# Altium footprint library Module.PcbLib: 88 footprints (part 1 of 6)
Each footprint in its own frame and in the unit in brackets; x right, y up, seen from the top. Pads: shape width x height; smd on the part's side, far side on the other; paste and mask are expansions set on the pad; w line width, h text height; cw(c..) or ccw(c..) is an arc to the next point about the centre after c.
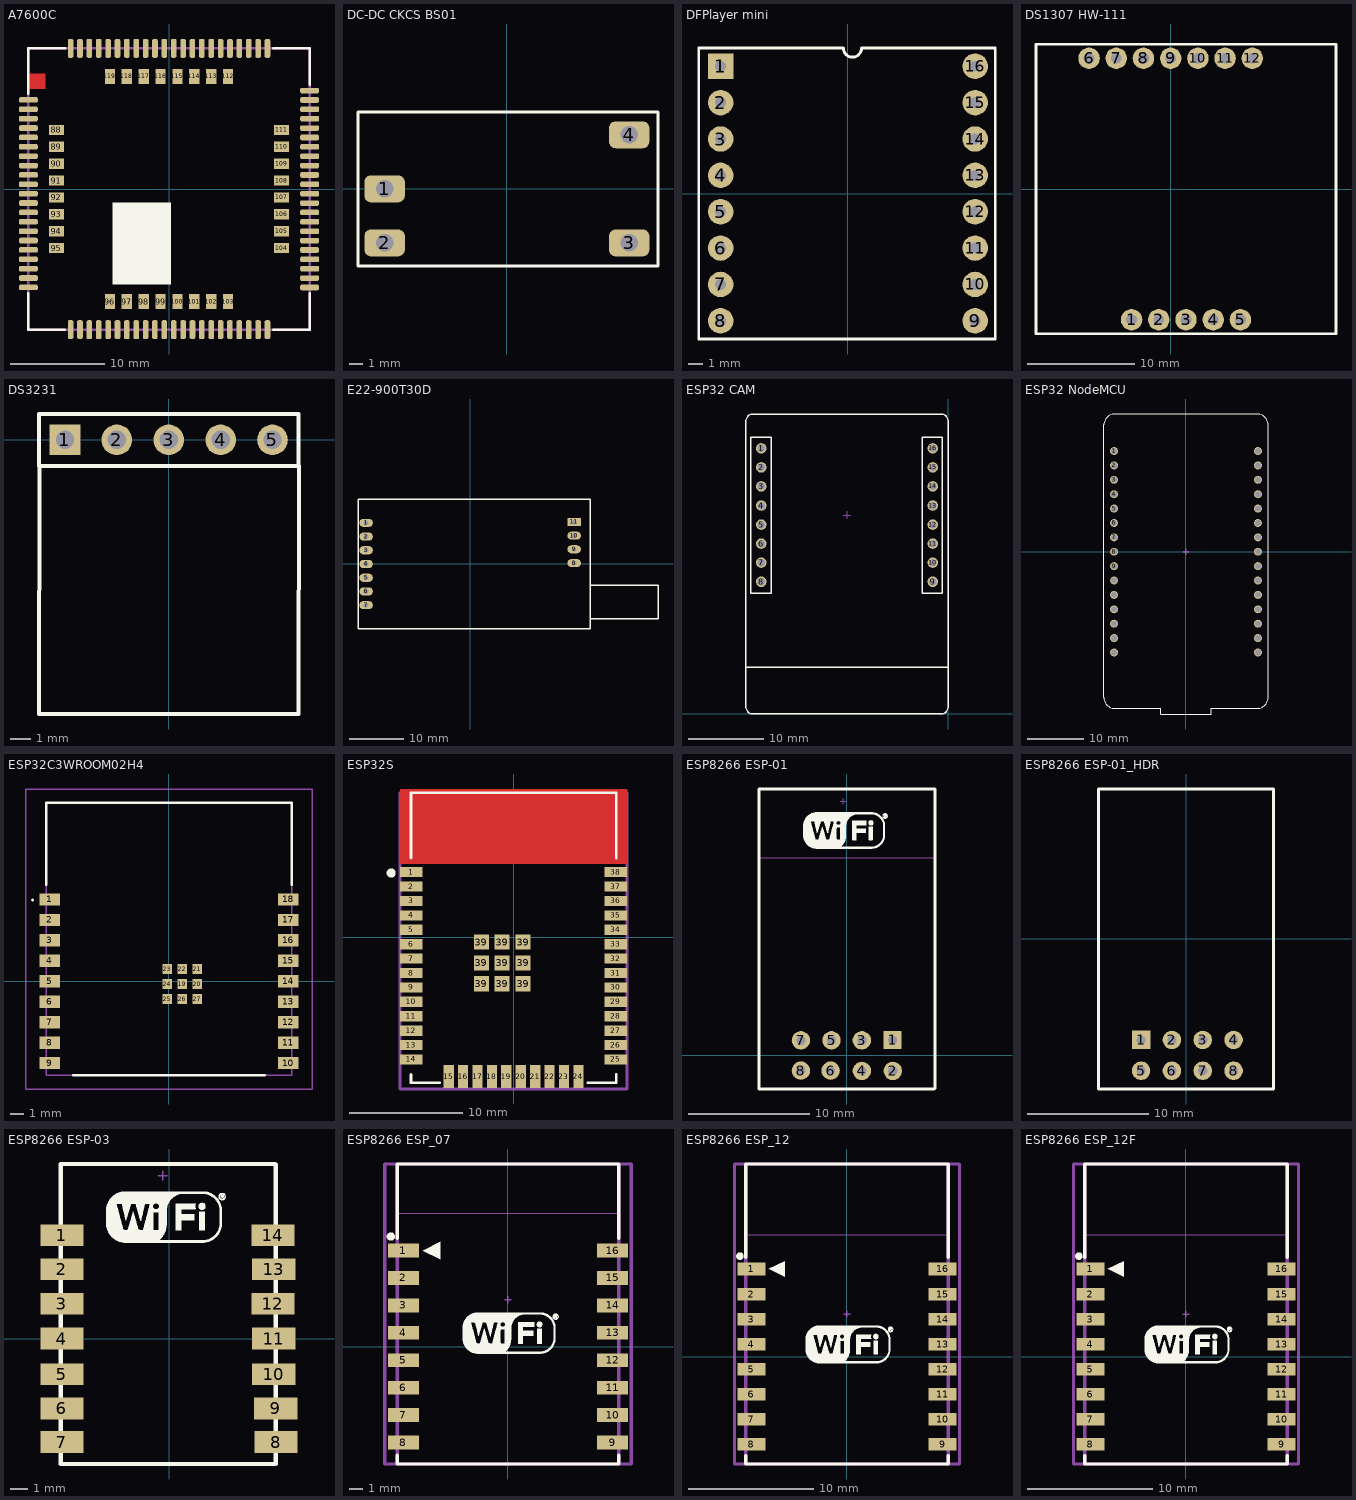
[diagram p0: the footprints below, top view; thin cyan lines are the x and y axes]

## A7600C [mm] "SIM7600 Series"
pads (119):
  rrect50% 2x0.6 smd mask+0.102: 1(-15,9.5) 2(-15,8.5) 3(-15,7.5) 4(-15,6.5) 5(-15,5.5) 6(-15,4.5) 7(-15,3.5) 8(-15,2.5) 9(-15,1.5) 10(-15,0.5) 11(-15,-0.5) 12(-15,-1.5) 13(-15,-2.5) 14(-15,-3.5) 15(-15,-4.5) 16(-15,-5.5) 17(-15,-6.5) 18(-15,-7.5) 19(-15,-8.5) 20(-15,-9.5) 41(15,-9.5) 42(15,-8.5) 43(15,-7.5) 44(15,-6.5) 45(15,-5.5) 46(15,-4.5) 47(15,-3.5) 48(15,-2.5) 49(15,-1.5) 50(15,-0.5) 51(15,0.5) 52(15,1.5) 53(15,2.5) 54(15,3.5) 55(15,4.5) 56(15,5.5) 57(15,6.5) 58(15,7.5) 59(15,8.5) 60(15,9.5) 81(-15,-10.5) 82(15,-10.5) 85(15,10.5)
  rrect50% 0.6x2 smd mask+0.102: 21(-9.5,-15) 22(-8.5,-15) 23(-7.5,-15) 24(-6.5,-15) 25(-5.5,-15) 26(-4.5,-15) 27(-3.5,-15) 28(-2.5,-15) 29(-1.5,-15) 30(-0.5,-15) 31(0.5,-15) 32(1.5,-15) 33(2.5,-15) 34(3.5,-15) 35(4.5,-15) 36(5.5,-15) 37(6.5,-15) 38(7.5,-15) 39(8.5,-15) 40(9.5,-15) 61(9.5,15) 62(8.5,15) 63(7.5,15) 64(6.5,15) 65(5.5,15) 66(4.5,15) 67(3.5,15) 68(2.5,15) 69(1.5,15) 70(0.5,15) 71(-0.5,15) 72(-1.5,15) 73(-2.5,15) 74(-3.5,15) 75(-4.5,15) 76(-5.5,15) 77(-6.5,15) 78(-7.5,15) 79(-8.5,15) 80(-9.5,15) 83(10.5,-15) 84(-10.5,-15) 86(-10.5,15) 87(10.5,15)
  rect 1.6x1.1 smd mask+0.102: 88(-12,6.3) 89(-12,4.5) 90(-12,2.7) 91(-12,0.9) 92(-12,-0.9) 93(-12,-2.7) 94(-12,-4.5) 95(-12,-6.3) 104(12,-6.3) 105(12,-4.5) 106(12,-2.7) 107(12,-0.9) 108(12,0.9) 109(12,2.7) 110(12,4.5) 111(12,6.3)
  rect 1.1x1.6 smd mask+0.102: 96(-6.3,-12) 97(-4.5,-12) 98(-2.7,-12) 99(-0.9,-12) 100(0.9,-12) 101(2.7,-12) 102(4.5,-12) 103(6.3,-12) 112(6.3,12) 113(4.5,12) 114(2.7,12) 115(0.9,12) 116(-0.9,12) 117(-2.7,12) 118(-4.5,12) 119(-6.3,12)
Top Layer:
  pour cut-out: -15,12.3 -13.2,12.3 -13.2,10.7 -15,10.7
Top Overlay:
  region: -6.02,-10.16 0.178,-10.16 0.178,-1.473 -6.02,-1.473
  lines w0.254: -15,-11.125 -15,-15 -11.1,-15 ; -15,10.135 -15,15 -11.074,15 ; 11.1,15 15,15 15,11.125 ; 11.125,-15 15,-15 15,-11.1
Top Designator:
  text ".Designator" at -3.711,-0.344 h1.52
Mechanical 15:
  lines w0.254: -15,-15 -15,15 15,15 15,-15 -15,-15
3D body "User Library-User Library-SIM7600C.step": height 3.17, standoff 0, extent -15,-15 15,15

## DC-DC CKCS BS01 [mm] "DC-DC Convert"
pads (4):
  rrect50% 3x2 hole 1.3: 1(-9.05,0) 2(-9.05,-4) 3(9.05,-4) 4(9.05,4)
Top Overlay:
  lines w0.254: -11.015,-5.712 -11.015,5.688 11.185,5.688 11.185,-5.712 -11.015,-5.712
Top Designator:
  text ".Designator" at -3.626,-0.356 h1.52
Mechanical 12:
  text ".Designator" at -4.783,-0.463 h2
3D body "CKCS BS01 MT-3608 Boost Converter.step": height 4.1, standoff 0.3, extent -11.015,-5.612 11.185,5.588

## DFPlayer mini [mil] "DFPlayer mini"
pads (16):
  rect 70x70 hole 30: 1(-350,350)
  round 70 hole 30: 2(-350,250) 3(-350,150) 4(-350,50) 5(-350,-50) 6(-350,-150) 7(-350,-250) 8(-350,-350) 9(350,-350) 10(350,-250) 11(350,-150) 12(350,-50) 13(350,50) 14(350,150) 15(350,250) 16(350,350)
Top Overlay:
  lines w7.87: -410,-400 -410,400 -12.52,400 ccw(c12.48,400) 37.48,400 405,400 405,-400 -410,-400
Top Designator:
  text ".Designator" at -148.6,-65.91 h60
3D body "DFPlayer Mini Assem v1.step": height 228.11, standoff -212.83, extent -411.95,-514.17 406.95,409.45

## DS1307 HW-111 [mm]
pads (12):
  round 2 hole 1 mask+0.102: 1(-3.65,-12.2) 2(-1.11,-12.2) 3(1.43,-12.2) 4(3.97,-12.2) 5(6.51,-12.2) 6(-7.62,12.2) 7(-5.08,12.2) 8(-2.54,12.2) 9(0,12.2) 10(2.54,12.2) 11(5.08,12.2) 12(7.62,12.2)
Top Overlay:
  lines w0.254: -12.57,-13.5 -12.57,13.5 15.43,13.5 15.43,-13.5 -12.57,-13.5
Top Designator:
  text ".Designator" at -2.281,-0.344 h1.52
Mechanical 12:
  text ".Designator" at -6.086,-0.564 h2.5
3D body "HW-111_RTCmodule_DS1307.STEP": height 15.99, standoff 5.8, extent -12.82,-13.75 15.68,13.75
3D body "female_header_a-bl254-eg-g05d.stp": height 8.6, standoff -3.1, extent -5.045,-13.45 7.905,-10.95
3D body "pin_header_aw140-eg-g02a.stp": height 15.08, standoff 2.68, extent -4.92,-13.45 0.06,-10.95
3D body "pin_header_aw140-eg-g02a.stp": height 15.08, standoff 2.68, extent 0.16,-13.45 5.14,-10.95
3D body "pin_header_aw140-eg-g02a.stp": height 15.08, standoff 2.68, extent 2.7,-13.45 7.68,-10.95
3D body "female_header_a-bl254-eg-g05d.stp": height 8.6, standoff -3.1, extent -9.015,10.95 3.935,13.45
3D body "pin_header_aw140-eg-g02a.stp": height 15.08, standoff 2.68, extent -8.89,10.95 -3.91,13.45
3D body "female_header_a-bl254-eg-g05d.stp": height 8.6, standoff -3.1, extent -3.935,10.95 9.015,13.45
3D body "pin_header_aw140-eg-g02a.stp": height 15.08, standoff 2.68, extent -3.81,10.95 1.17,13.45
3D body "pin_header_aw140-eg-g02a.stp": height 15.08, standoff 2.68, extent -1.27,10.95 3.71,13.45
3D body "pin_header_aw140-eg-g02a.stp": height 15.08, standoff 2.68, extent 3.81,10.95 8.79,13.45

## DS3231 [mm] "DS3231 real time"
pads (5):
  rect 1.5x1.5 hole 0.9: 1(-5.08,0)
  round 1.5 hole 0.9: 2(-2.54,0) 3(0,0) 4(2.54,0) 5(5.08,0)
Top Overlay:
  lines w0.2: -6.319,-1.322 -6.345,-13.422 6.35,-13.422 6.377,-1.27 ; -6.35,-1.27 6.35,-1.27 6.35,1.27 -6.35,1.27 -6.35,-1.27
Top Designator:
  text ".Designator" at -3.698,-6.42 h1.52
3D body: height 1.5, standoff 0, extent 3.81,-1.27 6.35,1.27
3D body: height 7, standoff -1, extent 4.67,-0.407 5.47,0.393
3D body: height 1.5, standoff 0, extent 1.27,-1.27 3.81,1.27
3D body: height 7, standoff -1, extent 2.13,-0.407 2.93,0.393
3D body: height 1.5, standoff 0, extent -1.27,-1.27 1.27,1.27
3D body: height 7, standoff -1, extent -0.41,-0.407 0.39,0.393
3D body: height 1.5, standoff 0, extent -3.81,-1.27 -1.27,1.27
3D body: height 7, standoff -1, extent -2.95,-0.407 -2.15,0.393
3D body: height 1.5, standoff 0, extent -6.35,-1.27 -3.81,1.27
3D body: height 7, standoff -1, extent -5.49,-0.407 -4.69,0.393
3D body "User Library-DS3231 Mini.STEP": height 13.07, standoff 1.52, extent -6.39,-13.348 6.35,1.257

## E22-900T30D [mm]
pads (11):
  oval 2.5x1.5 hole 0.9: 1(-19.25,7.53) 2(-19.25,4.99) 3(-19.25,2.45) 4(-19.25,-0.09) 5(-19.25,-2.63) 6(-19.25,-5.17) 7(-19.25,-7.71) 8(19.25,0.09) 9(19.25,2.63) 10(19.25,5.17)
  rect 2.5x1.5 hole 0.9: 11(19.25,7.71)
Top Overlay:
  lines w0.254: 22.25,-10.19 34.75,-10.19 34.75,-3.99 22.25,-3.99 ; -20.75,-12.09 22.25,-12.09 22.25,11.91 -20.75,11.91 -20.75,-12.09
Top Designator:
  text ".Designator" at 3.289,-0.434 h1.52
Mechanical 12:
  text "Anten / SMA-K" at 22.25,-10.19 h3
  text ".Designator" at -7.303,-0.677 h3
3D body "pin_header_aw140-eg-g02a.stp": height 14.88, standoff 2.48, extent -20.5,-1.36 -18,3.62
3D body "pin_header_aw140-eg-g02a.stp": height 14.88, standoff 2.48, extent -20.5,-3.9 -18,1.08
3D body "pin_header_aw140-eg-g02a.stp": height 14.88, standoff 2.48, extent -20.5,3.72 -18,8.7
3D body "pin_header_aw140-eg-g02a.stp": height 14.88, standoff 2.48, extent -20.5,-8.98 -18,-4
3D body "pin_header_aw140-eg-g02a.stp": height 14.88, standoff 2.48, extent 18,-1.18 20.5,3.8
3D body "pin_header_aw140-eg-g02a.stp": height 14.88, standoff 2.48, extent 18,3.9 20.5,8.88
3D body "E22-900T30D.step": height 16.37, standoff 10.03, extent -20.877,-12.09 34.823,11.91
3D body "female_header_a-bl254-eg-g07d.stp": height 8.5, standoff -3.2, extent -20.5,-9.105 -18,8.925
3D body "female_header_a-bl254-eg-g04d.stp": height 8.5, standoff -3.2, extent 18,-1.305 20.5,9.105

## ESP32 CAM [mm]
pads (16):
  round 1.4 / inner round 1.4 / far side oval 2.2x1.4 hole 1: 1(-24.93,35.42) 2(-24.93,32.88) 3(-24.93,30.34) 4(-24.93,27.8) 5(-24.93,25.26) 6(-24.93,22.72) 7(-24.93,20.18) 8(-24.93,17.64) 9(-2.07,17.64) 10(-2.07,20.18) 11(-2.07,22.72) 12(-2.07,25.26) 13(-2.07,27.8) 14(-2.07,30.34) 15(-2.07,32.88) 16(-2.07,35.42)
Top Overlay:
  lines w0.2: -27,6.218 0,6.218 ; -27,1 ccw(c-26,1) -26,0 -1,0 ccw(c-1,1) 0,1 0,39 ccw(c-1,39) -1,40 -26,40 ccw(c-26,39) -27,39 -27,1 ; -26.33,16.13 -26.33,36.93 -23.63,36.93 -23.63,16.13 -26.33,16.13 ; -3.47,16.13 -0.77,16.13 -0.77,36.93 -3.47,36.93 -3.47,16.13
Top Designator:
  text ".Designator" at -9.789,26.874 h1.52
Top Assembly:
  lines w0.15: -14,26.53 -13,26.53 ; -13.5,26.03 -13.5,27.03
3D body "ESP3-CAM.STEP": height 20.27, standoff 2.19, extent -27,-0.25 0,40.25
3D body "female_header_a-bl254-eg-g08d.stp": height 8.5, standoff -3.2, extent -3.32,16.247 -0.82,36.817
3D body "female_header_a-bl254-eg-g08d.stp": height 8.5, standoff -3.2, extent -26.18,16.247 -23.68,36.817

## ESP32 NodeMCU [mm]
pads (30):
  round 1.4 / inner round 1.4 / far side oval 2.2x1.4 hole 1 mask+0.1: 1(-12.7,17.78) 2(-12.7,15.24) 3(-12.7,12.7) 4(-12.7,10.16) 5(-12.7,7.62) 6(-12.7,5.08) 7(-12.7,2.54) 8(-12.7,0) 9(-12.7,-2.54) 10(-12.7,-5.08) 11(-12.7,-7.62) 12(-12.7,-10.16) 13(-12.7,-12.7) 14(-12.7,-15.24) 15(-12.7,-17.78) 16(12.7,-17.78) 17(12.7,-15.24) 18(12.7,-12.7) 19(12.7,-10.16) 20(12.7,-7.62) 21(12.7,-5.08) 22(12.7,-2.54) 23(12.7,0) 24(12.7,2.54) 25(12.7,5.08) 26(12.7,7.62) 27(12.7,10.16) 28(12.7,12.7) 29(12.7,15.24) 30(12.7,17.78)
Top Overlay:
  lines w0.2: -14.5,-25.726 ccw(c-12.581,-25.726) -12.581,-27.645 -4.5,-27.645 -4.5,-28.645 4.5,-28.645 4.5,-27.645 12.581,-27.645 ccw(c12.581,-25.726) 14.5,-25.726 14.5,22.4 ccw(c12.581,22.4) 12.581,24.319 -12.581,24.319 ccw(c-12.581,22.4) -14.5,22.4 -14.5,-25.726
Top Designator:
  text ".Designator" at -3.786,-0.344 h1.52
Top Assembly:
  lines w0.254: -0.5,0 0.5,0 ; 0,-0.537 0,0.538
3D body "esp32_30pin.SLDPRT": height 15.86, standoff 2.33, extent -14.5,-28.645 14.5,24.319
3D body "female_header_a-bl254-eg-g05d.stp": height 8.5, standoff -3.2, extent -13.95,6.225 -11.45,19.175
3D body "female_header_a-bl254-eg-g05d.stp": height 8.5, standoff -3.2, extent -13.95,-6.475 -11.45,6.475
3D body "female_header_a-bl254-eg-g05d.stp": height 8.5, standoff -3.2, extent -13.95,-19.175 -11.45,-6.225
3D body "female_header_a-bl254-eg-g05d.stp": height 8.5, standoff -3.2, extent 11.45,6.225 13.95,19.175
3D body "female_header_a-bl254-eg-g05d.stp": height 8.5, standoff -3.2, extent 11.45,-6.475 13.95,6.475
3D body "female_header_a-bl254-eg-g05d.stp": height 8.5, standoff -3.2, extent 11.45,-19.175 13.95,-6.225

## ESP32C3WROOM02H4 [mm]
pads (27):
  rect 1.5x0.9 smd: 1(-8.75,6) 2(-8.75,4.5) 3(-8.75,3) 4(-8.75,1.5) 5(-8.75,0) 6(-8.75,-1.5) 7(-8.75,-3) 8(-8.75,-4.5) 9(-8.75,-6) 10(8.75,-6) 11(8.75,-4.5) 12(8.75,-3) 13(8.75,-1.5) 14(8.75,0) 15(8.75,1.5) 16(8.75,3) 17(8.75,4.5) 18(8.75,6)
  rect 0.7x0.7 smd: 19(0.96,-0.2) 20(2.06,-0.2) 21(2.06,0.9) 22(0.96,0.9) 23(-0.14,0.9) 24(-0.14,-0.2) 25(-0.14,-1.3) 26(0.96,-1.3) 27(2.06,-1.3)
Top Overlay:
  lines w0.1: -10,5.9 cw(c-10,5.95) -10,6 cw(c-10,5.95) -10,5.9
  lines w0.2: -9,7.1 -9,13.1 9,13.1 9,7.1 ; -7,-6.9 7,-6.9
Top Designator:
  text ".Designator" at -3.711,2.756 h1.52
Mechanical 13:
  lines w0.1: -9,-6.9 -9,13.1 9,13.1 9,-6.9 -9,-6.9
Mechanical 15:
  lines w0.1: -10.5,-7.9 -10.5,14.1 10.5,14.1 10.5,-7.9 -10.5,-7.9
3D body "esp32C3WROOM02H4 v0.step": height 3.3, standoff 0, extent -9,-6.9 9,13.1

## ESP32S [mm]
pads (47):
  rect 2x0.9 smd paste+0 mask+0: 1(-9.005,5.76) 2(-9.005,4.49) 3(-9.005,3.22) 4(-9.005,1.95) 5(-9.005,0.68) 6(-9.005,-0.59) 7(-9.005,-1.86) 8(-9.005,-3.13) 9(-9.005,-4.4) 10(-9.005,-5.67) 11(-9.005,-6.94) 12(-9.005,-8.21) 13(-9.005,-9.48) 14(-9.005,-10.75) 25(9.005,-10.75) 26(9.005,-9.48) 27(9.005,-8.21) 28(9.005,-6.94) 29(9.005,-5.67) 30(9.005,-4.4) 31(9.005,-3.13) 32(9.005,-1.86) 33(9.005,-0.59) 34(9.005,0.68) 35(9.005,1.95) 36(9.005,3.22) 37(9.005,4.49) 38(9.005,5.76)
  rect 0.9x2 smd paste+0 mask+0: 15(-5.715,-12.25) 16(-4.445,-12.25) 17(-3.175,-12.25) 18(-1.905,-12.25) 19(-0.635,-12.25) 20(0.635,-12.25) 21(1.905,-12.25) 22(3.175,-12.25) 23(4.445,-12.25) 24(5.715,-12.25)
  rect 1.33x1.33 smd paste+0 mask+0: 39(-2.835,-4.075) 39(-2.835,-2.24) 39(-2.835,-0.405) 39(-1,-4.075) 39(-1,-2.24) 39(-1,-0.405) 39(0.835,-4.075) 39(0.835,-2.24) 39(0.835,-0.405)
Top Layer:
  pour cut-out: -10,6.5 10,6.5 10,13.085 -10,13.085
Top Overlay:
  circle w0.4: c-10.78,5.685 r0.2
  lines w0.254: -9.05,-12.075 -9.05,-12.8 -6.54,-12.8 ; -9.05,7 -9.05,12.75 9.05,12.75 9.05,7 ; 6.54,-12.8 9.05,-12.8 9.05,-12.075
Top Designator:
  lines w0.254: -10,-13.35 -10,12.75 10,12.75 10,-13.35 -10,-13.35
  text ".Designator" at -4.869,-0.452 h2
3D body "ESP32_S.SLDPRT": height 3.3, standoff 0.05, extent -9,-12.75 9,12.75

## ESP8266 ESP-01 [mil] "ESP8266 ESP-01"
pads (8):
  rect 60x60 hole 30: 1(149,50.5)
  round 60 hole 30: 2(150,-50.5) 3(49,49.5) 4(49,-50.5) 5(-50,49.5) 6(-53,-49.5) 7(-150,49.5) 8(-150,-49.5)
Top Overlay:
  drawing of 1265 lines, arcs and shapes, not listed
  text ".Designator" at -302,-147.5 h39.37
Top Designator:
  text ".Designator" at -150.6,349.05 h60
Mechanical 12:
  text "ANTENNA AREA" at -276.96,848.09 h10
  text "CUTOUT POLYGON" at -276.96,828.09 h10
Mechanical 13:
  lines w2: -286.96,645.47 288,645.47
Mechanical 15:
  lines w3.94: -22,829.42 -2,829.42 ; -12,819.42 -12,839.42
3D body "User Library-Wi07C.STEP": height 231.4, standoff -228.35, extent -285.87,-108.69 285,867.69

## ESP8266 ESP-01_HDR [mil] "ESP8266 ESP-01"
pads (8):
  rect 60x60 hole 30: 1(-145.67,-327.17)
  round 60 hole 30: 2(-45.67,-327.17) 3(54.33,-327.17) 4(154.33,-327.17) 5(-145.67,-427.17) 6(-45.67,-427.17) 7(54.33,-427.17) 8(154.33,-427.17)
Top Overlay:
  lines w10: -283.46,-486.22 -283.46,486.22 283.46,486.22 283.46,-486.22 -283.46,-486.22
Top Designator:
  text ".Designator" at -146.1,-13.55 h60
Mechanical 12:
  text ".Designator" at 26.67,-287.52 h118.11
3D body "User Library-Wi07C.STEP": height 569.98, standoff 110.24, extent -285.43,-488.19 285.43,488.19
3D body "PBD-2.stp": height 334.65, standoff -124.02, extent -195.67,-477.16 -95.67,-277.16
3D body "PBD-2.stp": height 334.65, standoff -124.02, extent -95.67,-477.16 4.33,-277.16
3D body "PBD-2.stp": height 334.65, standoff -124.02, extent 4.33,-477.16 104.33,-277.16
3D body "PBD-2.stp": height 334.65, standoff -124.02, extent 104.33,-477.16 204.33,-277.16

## ESP8266 ESP-03 [mil] "ESP8266 ESP-03"
pads (14):
  rect 100x50 smd: 1(-246.5,238.22) 2(-246.5,159.48) 3(-246.5,80.22) 4(-246.5,0.22) 5(-246.5,-81.78) 6(-246.5,-160.78) 7(-246.5,-238.22) 8(246.5,-238.22) 9(245.5,-160.78) 10(241.5,-81.78) 11(241.5,0.22) 12(239.5,80.22) 13(241.5,159.48) 14(239.5,238.22)
Top Overlay:
  drawing of 1265 lines, arcs and shapes, not listed
  text ".Designator" at -250.5,-331.78 h39.37
Top Designator:
  text ".Designator" at -146.1,20.47 h60
Mechanical 15:
  lines w3.94: -24.5,375.13 -4.5,375.13 ; -14.5,365.13 -14.5,385.13
3D body "User Library-ESP-03.STEP": height 134.34, standoff -1.09, extent -245.47,-282.78 238.78,398.32

## ESP8266 ESP_07 [mm] "ESP-07F ESP8266"
pads (16):
  rect 2.25x1 smd: 1(-7.625,7) 2(-7.625,5) 3(-7.625,3) 4(-7.625,1) 5(-7.625,-1) 6(-7.625,-3) 7(-7.625,-5) 8(-7.625,-7) 9(7.625,-7) 10(7.625,-5) 11(7.625,-3) 12(7.625,-1) 13(7.625,1) 14(7.625,3) 15(7.625,5) 16(7.625,7)
Top Overlay:
  drawing of 1268 lines, arcs and shapes, not listed
Top Designator:
  text ".Designator" at -3.711,2.03 h1.52
Mechanical 13:
  lines w0.051: -8.127,9.727 -8.127,13.316 8.129,13.316 8.129,9.727 -8.127,9.727
  lines w0.254: -8.084,-8.568 8.084,-8.568 8.084,13.316 -8.084,13.316 -8.084,-8.568
Mechanical 15:
  lines w0.1: -0.254,3.402 0.254,3.402 ; 0,3.148 0,3.656
  lines w0.254: -8.975,-8.568 -8.975,13.316 8.975,13.316 8.975,-8.568 -8.975,-8.568
3D body "User Library-ESP07-1.step": height 3.5, standoff -0.01, extent -7.972,-8.684 8.028,13.316

## ESP8266 ESP_12 [mm] "ESP8266 ESP-12"
height 3.2
pads (16):
  rect 2.25x1 smd: 1(-7.625,7) 2(-7.625,5) 3(-7.625,3) 4(-7.625,1) 5(-7.625,-1) 6(-7.625,-3) 7(-7.625,-5) 8(-7.625,-7) 9(7.625,-7) 10(7.625,-5) 11(7.625,-3) 12(7.625,-1) 13(7.625,1) 14(7.625,3) 15(7.625,5) 16(7.625,7)
Top Overlay:
  drawing of 1268 lines, arcs and shapes, not listed
  text ".Designator" at -8.433,-9.398 h1
Top Designator:
  text ".Designator" at -3.711,2.706 h1.52
Mechanical 12:
  text "ANTENNA AREA" at -7.873,14.874 h0.25
  text "CUTOUT POLYGON" at -7.873,14.366 h0.25
Mechanical 13:
  lines w0.051: -8.127,9.727 -8.127,15.382 8.129,15.382 8.129,9.727 -8.127,9.727
  lines w0.254: -8.084,-8.568 8.084,-8.568 8.084,15.371 -8.084,15.371 -8.084,-8.568
Mechanical 15:
  lines w0.1: -0.254,3.402 0.254,3.402 ; 0,3.148 0,3.656
  lines w0.254: -8.975,-8.568 -8.975,15.371 8.975,15.371 8.975,-8.568 -8.975,-8.568
3D body "ESP_12_ENew.STEP": height 3.82, standoff -0.05, extent -7.859,-8.522 8.156,15.509

## ESP8266 ESP_12F [mm] "ESP-12F ESP8266"
pads (16):
  rect 2.25x1 smd: 1(-7.625,7) 2(-7.625,5) 3(-7.625,3) 4(-7.625,1) 5(-7.625,-1) 6(-7.625,-3) 7(-7.625,-5) 8(-7.625,-7) 9(7.625,-7) 10(7.625,-5) 11(7.625,-3) 12(7.625,-1) 13(7.625,1) 14(7.625,3) 15(7.625,5) 16(7.625,7)
Top Overlay:
  drawing of 1268 lines, arcs and shapes, not listed
Top Designator:
  text ".Designator" at -3.711,3.057 h1.52
Mechanical 13:
  lines w0.051: -8.127,9.727 8.129,9.727 8.129,15.382 -8.127,15.382 -8.127,9.727
  lines w0.254: -8.084,-8.568 -8.084,15.371 8.084,15.371 8.084,-8.568 -8.084,-8.568
Mechanical 15:
  lines w0.1: -0.254,3.402 0.254,3.402 ; 0,3.148 0,3.656
  lines w0.254: -8.975,-8.568 8.975,-8.568 8.975,15.371 -8.975,15.371 -8.975,-8.568
3D body "ESP-12F.STEP": height 3.17, standoff 0, extent -8,-8.598 8,15.402